# Altium integrated library Transformers.IntLib: 24 symbols (part 2 of 2)

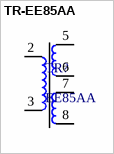
[diagram p23: symbol TR-EE85AA]

## TR-EE85AA
designator TR?, comment EE85AA
footprint EE84AA Hor
pins: 2, 3, 5, 6, 7, 8